# Altium schematic symbol library exb6202.SchLib: 1 symbol
Pins are listed as number, name and electrical type; pins without a type are passive.

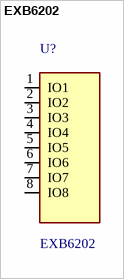
[diagram p0: symbol EXB6202]

## EXB6202
designator U?
SPDX-License-Identifier: CC0-1.0; Authored for Fenolite; https://example.invalid/exb6202
pins: 1 IO1, 2 IO2, 3 IO3, 4 IO4, 5 IO5, 6 IO6, 7 IO7, 8 IO8